# EAGLE library part HDR-1X6 (library rtd2660_board)
1 x 6 pin header 2.54 mm
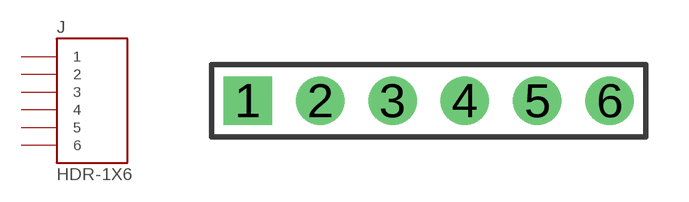
[diagram p4: symbol with the pads of HDR1X6-2.54; footprint HDR1X6-2.54]

Designator prefix J

## HDR-1X6  [HDR1X6-2.54]
1  1  pas
2  2  pas
3  3  pas
4  4  pas
5  5  pas
6  6  pas

## Footprint HDR1X6-2.54 (pad centres in mm)
1 x 6 pin header, 2.54 mm pitch
drill 1 pad 1.7 square: 1 0,0
drill 1 pad 1.7 round: 2 2.54,0; 3 5.08,0; 4 7.62,0; 5 10.16,0; 6 12.7,0